# Altium footprint library CAPC2012X145N.PcbLib: 1 footprints
Each footprint in its own frame and in the unit in brackets; x right, y up, seen from the top. Pads: shape width x height; smd on the part's side, far side on the other; paste and mask are expansions set on the pad; w line width, h text height; cw(c..) or ccw(c..) is an arc to the next point about the centre after c.
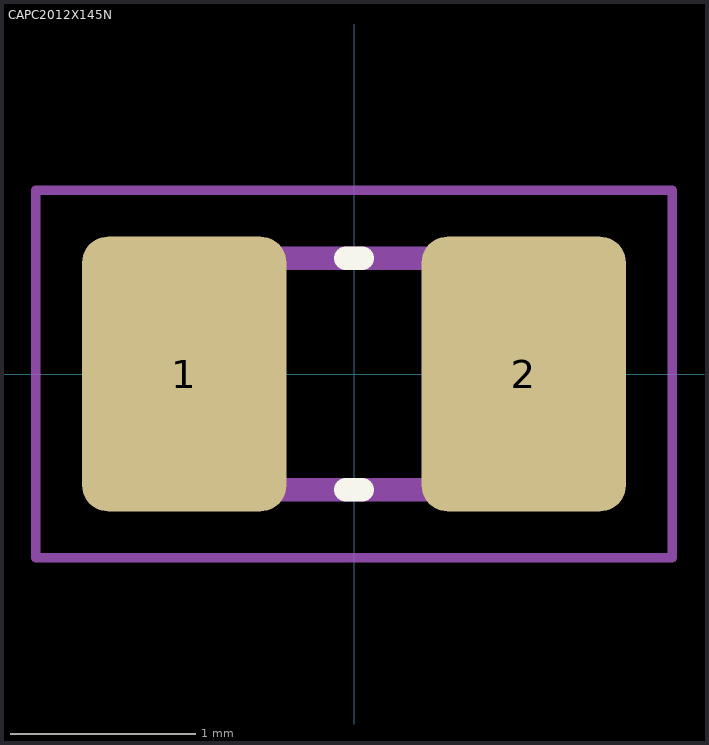
[diagram p0: the footprint, top view; thin cyan lines are the x and y axes]

## CAPC2012X145N [mm]
height 1.45
pads (2):
  rrect25% 1.1x1.48 smd: 1(-0.915,0) 2(0.915,0)
Top Overlay:
  lines w0.127: -0.045,-0.625 0.045,-0.625 ; -0.045,0.625 0.045,0.625
Assembly Top:
  lines w0.127: -1,-0.625 1,-0.625 1,0.625 -1,0.625 -1,-0.625
Courtyard Top:
  lines w0.05: -1.715,-0.99 1.715,-0.99 1.715,0.99 -1.715,0.99 -1.715,-0.99